# Altium schematic symbol library Capacitor.SchLib: 735 symbols (part 12 of 20)
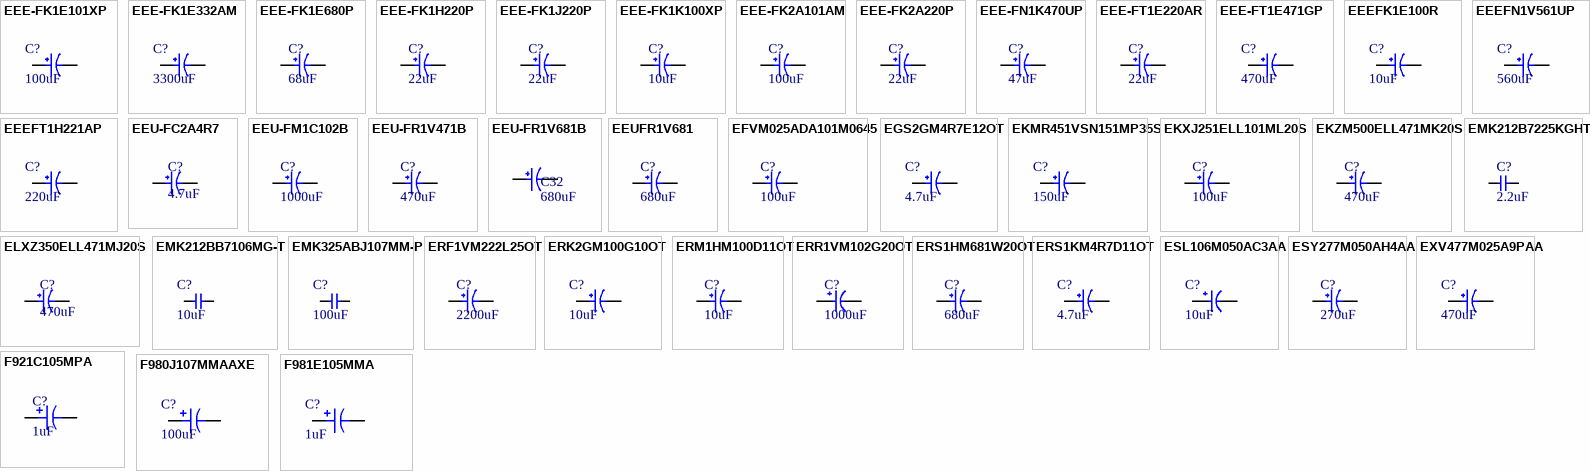
[diagram p29: symbols EEE-FK1E101XP to F981E105MMA]

## EEEFK1E100R
designator C?, comment 10uF
CAP ALUM 10UF 20% 25V SMD; Manufacturer: Panasonic; Manufacturer Part Number: EEE-FK1E100R; Dielectric Material: Aluminium; Ripple Current: 90mA; ESR (Equivalent Series Resistance): 1.35R; Polarity: Polar; Life (Hours): 2000Hour; Leakage Current: 3uA; Item Type: Capacitor; Supplier 1: Digi-Key; Stock 1: 332; Pricing 1: 1=0.38, 10=0.264, 50=0.1852, 100=0.1587, 500=0.11902, 1000=0.10051 (USD); Mount: Surface Mount,PCB; Case/Package: Radial; Number of Pins: 2; Contact Plating: Tin; Min Operating Temperature: -55°C; Max Operating Temperature: 105°C; Capacitance: 10uF; Tolerance: 20%; Voltage Rating (DC): 25V; Packaging: Tape and Reel; Voltage Rating: 25V; Ripple Current (AC): 90mA; Impedance: 1.35R; Package Quantity: 1; Termination: SMD/SMT; Voltage: 25V; Series: FK; Construction: Cylindrical; Diameter: 4mm; Length: 5.8mm; Width: 5.5mm; Height: 5.8mm; Height - Seated (Max): 0.24inch; Radiation Hardening: No; REACH SVHC: No SVHC; Lead Free: Lead Free; RoHS Compliant: Yes; ComponentLink1URL: http://www.jameco.com/Jameco/Products/ProdDS/1357642.pdf?src-supplier=Jameco; ComponentLink1Description: http://www.jameco.com/Jameco/Products/ProdDS/1357642.pdf?src-supplier=Jameco; ComponentLink2URL: http://www.farnell.com/datasheets/2002520.pdf?src-supplier=Farnell; ComponentLink2Description: http://www.farnell.com/datasheets/2002520.pdf?src-supplier=Farnell; ComponentLink3URL: http://www.farnell.com/datasheets/58258.pdf?src-supplier=Element14; ComponentLink3Description: http://www.farnell.com/datasheets/58258.pdf?src-supplier=Element14; ComponentLink4URL: http://www.mouser.com/ds/2/315/ABA0000CE120-68386.pdf?src-supplier=Mouser; ComponentLink4Description: http://www.mouser.com/ds/2/315/ABA0000CE120-68386.pdf?src-supplier=Mouser; ComponentLink5URL: http://uk.rs-online.com/webdocs/139e/0900766b8139e400.pdf?src-supplier=RSComponents; ComponentLink5Description: http://uk.rs-online.com/webdocs/139e/0900766b8139e400.pdf?src-supplier=RSComponents; ComponentLink6URL: http://www.farnell.com/datasheets/2813657.pdf?src-supplier=Farnell; ComponentLink6Description: http://www.farnell.com/datasheets/2813657.pdf?src-supplier=Farnell; ComponentLink7URL: http://www.farnell.com/datasheets/2002520.pdf?src-supplier=Element14; ComponentLink7Description: http://www.farnell.com/datasheets/2002520.pdf?src-supplier=Element14; ComponentLink8URL: http://www.farnell.com/datasheets/1676921.pdf?src-supplier=Element14; ComponentLink8Description: http://www.farnell.com/datasheets/1676921.pdf?src-supplier=Element14; ComponentLink9URL: http://industrial.panasonic.com/www-data/pdf/ABA0000/ABA0000CE120.pdf?src-supplier=Avnet; ComponentLink9Description: http://industrial.panasonic.com/www-data/pdf/ABA0000/ABA0000CE120.pdf?src-supplier=Avnet; ComponentLink10URL: http://industrial.panasonic.com/www-data/pdf/ABA0000/ABA0000CE120.pdf?src-supplier=Future+Electronics; ComponentLink10Description: http://industrial.panasonic.com/www-data/pdf/ABA0000/ABA0000CE120.pdf?src-supplier=Future+Electronics; ComponentLink11URL: https://www.verical.com/server-webapp/html/getDatasheet?partID=134702&src-supplier=Verical; ComponentLink11Description: https://www.verical.com/server-webapp/html/getDatasheet?partID=134702&src-supplier=Verical; ComponentLink12URL: http://industrial.panasonic.com/www-data/pdf/ABA0000/ABA0000CE120.pdf?src-supplier=Avnet+Europe; ComponentLink12Description: http://industrial.panasonic.com/www-data/pdf/ABA0000/ABA0000CE120.pdf?src-supplier=Avnet+Europe; Supplier Part Number 1: PCE3795CT-ND; LCSC Part Number: C178538
footprint EEEFK1E100R_
pins: 1, 2

## EEEFN1V561UP
designator C?, comment 560uF
CAP ALUM 560UF 20% 35V SMD; Manufacturer: Panasonic; Manufacturer Part Number: EEE-FN1V561UP; Item Type: Capacitor; Supplier 1: Rs; RoHS: No; Category: Capacitors; Stock 1: 500; Pricing 1: 100=0.47200, 250=0.44600 (GBP); ComponentLink1URL: http://datasheet.octopart.com/EEEFN1V561UP-Panasonic-datasheet-150570765.pdf?src-supplier=Rs; ComponentLink1Description: http://datasheet.octopart.com/EEEFN1V561UP-Panasonic-datasheet-150570765.pdf?src-supplier=Rs; Supplier Part Number 1: 2043401P; LCSC Part Number: C494848
footprint EEEFN1V561UP
pins: 1, 2

## EEEFT1H221AP
designator C?, comment 220uF
CAP ALUM 220UF 20% 50V SMD; Manufacturer: Panasonic; Manufacturer Part Number: EEEFT1H221AP; Dielectric Material: Aluminium; Ripple Current: 670mA; ESR (Equivalent Series Resistance): 180mR; Life (Hours): 2000Hour; Leakage Current: 110uA; Lead Diameter: 0.9mm; Item Type: Capacitor; Supplier 1: Avnet; RoHS: Yes; Category: Aluminum Electrolytic Capacitors; Stock 1: 22638; Pricing 1: 1=1.43000, 10=1.11000, 25=1.01000, 50=0.90500, 100=0.80400 (USD); Mount: Surface Mount,PCB; Case/Package: Radial; Number of Pins: 2; Contact Plating: Tin; Min Operating Temperature: -55°C; Max Operating Temperature: 105°C; Capacitance: 220uF; Voltage Rating: 50V; Tolerance: 20%; Packaging: Tape and Reel; Package Quantity: 500; Ripple Current (AC): 670mA; Voltage Rating (DC): 50V; Termination: SMD/SMT; Voltage: 50V; Series: FT; Construction: Cylindrical; Diameter: 8mm; Length: 10.2mm; Height: 10.2mm; Lead Pitch: 3.1mm; Height - Seated (Max): 0.413inch; Ratings: AEC-Q200; Radiation Hardening: No; Reach SVHC Compliant: Yes; Lead Free: Lead Free; RoHS Compliant: Yes; ComponentLink1URL: https://datasheet.ciiva.com/11783/0900766b80f4973e-11783665.pdf?src-supplier=RSComponents; ComponentLink1Description: https://datasheet.ciiva.com/11783/0900766b80f4973e-11783665.pdf?src-supplier=RSComponents; ComponentLink2URL: https://datasheet.ciiva.com/48523/smd-ft-eng-tds-48523263.pdf?src-supplier=Distrelec; ComponentLink2Description: https://datasheet.ciiva.com/48523/smd-ft-eng-tds-48523263.pdf?src-supplier=Distrelec; ComponentLink3URL: https://datasheet.ciiva.com/43458/1790597-43458703.pdf?src-supplier=Farnell; ComponentLink3Description: https://datasheet.ciiva.com/43458/1790597-43458703.pdf?src-supplier=Farnell; ComponentLink4URL: https://datasheet.ciiva.com/6025/1790597-6025836.pdf?src-supplier=Farnell; ComponentLink4Description: https://datasheet.ciiva.com/6025/1790597-6025836.pdf?src-supplier=Farnell; ComponentLink5URL: https://datasheet.ciiva.com/46376/1790597-46376766.pdf?src-supplier=Element14; ComponentLink5Description: https://datasheet.ciiva.com/46376/1790597-46376766.pdf?src-supplier=Element14; ComponentLink6URL: https://datasheet.ciiva.com/28691/1244238-28691159.pdf?src-supplier=Element14; ComponentLink6Description: https://datasheet.ciiva.com/28691/1244238-28691159.pdf?src-supplier=Element14; ComponentLink7URL: https://datasheet.ciiva.com/28691/1244238-28691150.pdf?src-supplier=Element14; ComponentLink7Description: https://datasheet.ciiva.com/28691/1244238-28691150.pdf?src-supplier=Element14; ComponentLink8URL: https://datasheet.ciiva.com/46385/1790597-46385166.pdf?src-supplier=Element14; ComponentLink8Description: https://datasheet.ciiva.com/46385/1790597-46385166.pdf?src-supplier=Element14; ComponentLink9URL: https://datasheet.ciiva.com/24070/aba0000ce135-31031-24070059.pdf?src-supplier=Mouser; ComponentLink9Description: https://datasheet.ciiva.com/24070/aba0000ce135-31031-24070059.pdf?src-supplier=Mouser; ComponentLink10URL: https://datasheet.ciiva.com/14599/70243693-14599500.pdf?src-supplier=Allied+Electronics; ComponentLink10Description: https://datasheet.ciiva.com/14599/70243693-14599500.pdf?src-supplier=Allied+Electronics; ComponentLink11URL: https://datasheet.ciiva.com/14607/70243693-14607598.pdf?src-supplier=Allied+Electronics; ComponentLink11Description: https://datasheet.ciiva.com/14607/70243693-14607598.pdf?src-supplier=Allied+Electronics; ComponentLink12URL: https://datasheet.ciiva.com/14606/70243693-14606280.pdf?src-supplier=Allied+Electronics; ComponentLink12Description: https://datasheet.ciiva.com/14606/70243693-14606280.pdf?src-supplier=Allied+Electronics; ComponentLink13URL: https://datasheet.ciiva.com/10331/aba0000ce135-10331093.pdf?src-supplier=Avnet; ComponentLink13Description: https://datasheet.ciiva.com/10331/aba0000ce135-10331093.pdf?src-supplier=Avnet; ComponentLink14URL: https://datasheet.ciiva.com/30060/aba0000ce135-30060199.pdf?src-supplier=Onlinecomponents.com; ComponentLink14Description: https://datasheet.ciiva.com/30060/aba0000ce135-30060199.pdf?src-supplier=Onlinecomponents.com; Supplier Part Number 1: 31T8183; LCSC Part Number: C178594
footprint EEEFT1H221AP
pins: 1, 2

## EEU-FC2A4R7
designator C?, comment 4.7uF
CAP ALUM 4.7UF 20% 100V RADIAL; Item Type: Capacitor; ComponentLink1Description: LCSC; Supplier: Mouser; Supplier Part Number: 667-EEU-FC2A4R7; RoHS: Yes; Category: Aluminum Electrolytic Capacitors; Stock: 2974; Pricing: 1=0.3, 10=0.165, 50=0.165, 100=0.106, 1000=0.089, 10000=0.072 (USD); ComponentLink2URL: https://datasheet.ciiva.com/6330/aba0000ce22-6330526.pdf?src-supplier=Digi-Key; ComponentLink2Description: https://datasheet.ciiva.com/6330/aba0000ce22-6330526.pdf?src-supplier=Digi-Key; ComponentLink3URL: https://datasheet.ciiva.com/22739/1790611-22739989.pdf?src-supplier=Farnell; ComponentLink3Description: https://datasheet.ciiva.com/22739/1790611-22739989.pdf?src-supplier=Farnell; ComponentLink4URL: https://datasheet.ciiva.com/22674/1790611-22674953.pdf?src-supplier=Element14; ComponentLink4Description: https://datasheet.ciiva.com/22674/1790611-22674953.pdf?src-supplier=Element14; ComponentLink5URL: https://datasheet.ciiva.com/30009/aba0000ce22-30009135.pdf?src-supplier=Avnet; ComponentLink5Description: https://datasheet.ciiva.com/30009/aba0000ce22-30009135.pdf?src-supplier=Avnet
footprint EEU-FC2A4R7
pins: 1, 2

## EEU-FM1C102B
designator C?, comment 1000uF
CAP ALUM 1000UF 20% 16V RADIAL; Manufacturer: Panasonic; Manufacturer Part Number: EEU-FM1C102B; Item Type: Capacitors; Value: 1mF; Ripple Current: 2.18A; Impedance: 19mR; Life (Hours): 5000Hour; Lead Diameter: 0.6mm; Supplier: Mouser; LCSC Part Number: C1588681; RoHS: Yes; Stock: 1140; Pricing: 1=0.79, 10=0.466, 50=0.466, 100=0.372, 1000=0.26, 10000=0.219 (USD); Mounting Technology: Through Hole; Case/Package: Radial; Min Operating Temperature: -40°C; Max Operating Temperature: 105°C; Voltage Rating: 16V; Tolerance: 20%; Packaging: Ammo Pack; Package Quantity: 500; Voltage Rating (DC): 16V; ESR (Equivalent Series Resistance): 19mR; Termination: Radial; Series: FM; Diameter: 10mm; Length: 20mm; Height: 20mm; Lead Pitch: 5mm; Height - Seated (Max): 0.866inch; Radiation Hardening: No; Lead Free: Lead Free; RoHS Compliant: Yes; ComponentLink1URL: https://datasheet.ciiva.com/24025/a-e-461514-24025941.pdf?src-supplier=Mouser; ComponentLink1Description: https://datasheet.ciiva.com/24025/a-e-461514-24025941.pdf?src-supplier=Mouser; ComponentLink2URL: https://datasheet.ciiva.com/11677/aba0000ce108-11677710.pdf?src-supplier=Avnet; ComponentLink2Description: https://datasheet.ciiva.com/11677/aba0000ce108-11677710.pdf?src-supplier=Avnet
footprint EEU-FM1C102B
pins: 1, 2

## EEU-FR1V471B
designator C?, comment 470uF
CAP ALUM 470UF 20% 35V RADIAL; Manufacturer: Panasonic; Manufacturer Part Number: EEU-FR1V471B; Item Type: Capacitor; Leakage Current: 164.5uA; Supplier: Mouser; LCSC Part Number: C713403; RoHS: Yes; Stock: 21799; Pricing: 1=0.78, 10=0.461, 50=0.461, 100=0.375, 1000=0.263, 10000=0.23 (USD); Pins: 2NUMBER; Lead Free: 5697LeadFree; ComponentLink1URL: https://datasheet.ciiva.com/43469/1653413-43469590.pdf?src-supplier=Farnell; ComponentLink1Description: https://datasheet.ciiva.com/43469/1653413-43469590.pdf?src-supplier=Farnell; ComponentLink2URL: https://datasheet.ciiva.com/11678/aba0000ce132-11678063.pdf?src-supplier=Avnet; ComponentLink2Description: https://datasheet.ciiva.com/11678/aba0000ce132-11678063.pdf?src-supplier=Avnet; ComponentLink3URL: https://datasheet.ciiva.com/46371/1653413-46371772.pdf?src-supplier=Element14; ComponentLink3Description: https://datasheet.ciiva.com/46371/1653413-46371772.pdf?src-supplier=Element14; ComponentLink4URL: https://datasheet.ciiva.com/7805/1725490-7805503.pdf?src-supplier=Element14; ComponentLink4Description: https://datasheet.ciiva.com/7805/1725490-7805503.pdf?src-supplier=Element14; ComponentLink5URL: https://datasheet.ciiva.com/30252/9aba0000ce132-30252342.pdf?src-supplier=Onlinecomponents.com; ComponentLink5Description: https://datasheet.ciiva.com/30252/9aba0000ce132-30252342.pdf?src-supplier=Onlinecomponents.com; ComponentLink6URL: https://datasheet.ciiva.com/16387/aba0000ce132-16387061.pdf?src-supplier=Future+Electronics; ComponentLink6Description: https://datasheet.ciiva.com/16387/aba0000ce132-16387061.pdf?src-supplier=Future+Electronics; ComponentLink7URL: https://datasheet.ciiva.com/14602/70257620-14602201.pdf?src-supplier=Allied+Electronics; ComponentLink7Description: https://datasheet.ciiva.com/14602/70257620-14602201.pdf?src-supplier=Allied+Electronics; ComponentLink8URL: https://datasheet.ciiva.com/29247/448536-da-01-en-alu-kondensator-fr-r-470-uf-35v-500st-29247995.pdf?src-supplier=Conrad; ComponentLink8Description: https://datasheet.ciiva.com/29247/448536-da-01-en-alu-kondensator-fr-r-470-uf-35v-500st-29247995.pdf?src-supplier=Conrad
footprint EEUFR1V471B
pins: 1, 2

## EEU-FR1V681B
designator C32, comment 680uF
CAP ALUM 680UF 20% 35V RADIAL TH; Manufacturer: Panasonic; Manufacturer Part Number: EEU-FR1V681B; Item Type: Capacitor; Ripple Current: 2.18A; Impedance: 20mR; Life (Hours): 10000Hour; Lead/Base Style: Straight; Lead Diameter: 0.6mm; Supplier: Digikey; LCSC Part Number: C178718; RoHS: Yes; Stock: 566; Pricing: 1=0.93, 10=0.674, 50=0.5894, 100=0.4803 (USD); Mounting Technology: Through Hole; Case/Package: Radial; Min Operating Temperature: -40°C; Max Operating Temperature: 105°C; Package Quantity: 500; Value: 680uF; Voltage Rating: 35V; Tolerance: 20%; Packaging: Tape and Reel; Voltage Rating (DC): 35V; ESR (Equivalent Series Resistance): 20mR; Termination: Radial; Series: FR; Features: General Purpose; Diameter: 10mm; Length: 20mm; Height: 20mm; Lead Pitch: 5mm; Height - Seated (Max): 0.866inch; Radiation Hardening: No; Reach SVHC Compliant: Yes; RoHS Compliant: Yes; ComponentLink1URL: https://datasheet.ciiva.com/11677/aba0000ce132-11677705.pdf?src-supplier=Avnet; ComponentLink1Description: https://datasheet.ciiva.com/11677/aba0000ce132-11677705.pdf?src-supplier=Avnet; ComponentLink2URL: https://datasheet.ciiva.com/15941/aba0000ce132-15941222.pdf?src-supplier=Onlinecomponents.com; ComponentLink2Description: https://datasheet.ciiva.com/15941/aba0000ce132-15941222.pdf?src-supplier=Onlinecomponents.com; ComponentLink3URL: https://datasheet.ciiva.com/43469/1653413-43469593.pdf?src-supplier=Farnell; ComponentLink3Description: https://datasheet.ciiva.com/43469/1653413-43469593.pdf?src-supplier=Farnell; ComponentLink4URL: https://datasheet.ciiva.com/46371/1653413-46371786.pdf?src-supplier=Element14; ComponentLink4Description: https://datasheet.ciiva.com/46371/1653413-46371786.pdf?src-supplier=Element14; ComponentLink5URL: https://datasheet.ciiva.com/29248/448590-da-01-en-alu-kondensator-fr-r-680-uf-35v-500st-29248054.pdf?src-supplier=Conrad; ComponentLink5Description: https://datasheet.ciiva.com/29248/448590-da-01-en-alu-kondensator-fr-r-680-uf-35v-500st-29248054.pdf?src-supplier=Conrad
footprint EEU-FR1V681B
pins: 1, 2

## EEUFR1V681
designator C?, comment 680uF
680uF 35V 20mΩ@100kHz ±20% 2.18A@100kHz Plugin,D10xL20mm Aluminum Electrolytic Capacitors - Leaded ROHS; Manufacturer: PANASONIC; Manufacturer Part Number: EEUFR1V681; Package: Plugin,D10xL20mm; LCSC Part Number: C178718; Item Type: Capacitor; ComponentLink1Description: LCSC; ComponentLink1URL: https://www.lcsc.com/product-detail/Aluminum-Electrolytic-Capacitors-Leaded_PANASONIC-EEUFR1V681_C178718.html
footprint EEUFR1V681
pins: 1, 2

## EFVM025ADA101M0645
designator C?, comment 100uF
100uF 25V ±20% SMD,D6.3xL4.5mm Aluminum Electrolytic Capacitors - SMD ROHS; Manufacturer: FOLLON; Manufacturer Part Number: EFVM025ADA101M0645; Package: SMD,D6.3xL4.5mm; LCSC Part Number: C33129633; Item Type: Capacitor; ComponentLink1Description: LCSC; ComponentLink1URL: https://lcsc.com/product-detail/Aluminum-Electrolytic-Capacitors-SMD_FOLLON-EFVM025ADA101M0645_C33129633.html
footprint EFVM025ADA101M0645
pins: 1, 2

## EGS2GM4R7E12OT
designator C?, comment 4.7uF
4.7uF 400V ±20% Plugin,D6.3xL12mm Aluminum Electrolytic Capacitors - Leaded ROHS; Manufacturer: AISHI; Manufacturer Part Number: EGS2GM4R7E12OT; Package: Plugin,D6.3xL12mm; ComponentLink1Description: LCSC; ComponentLink1URL: https://www.lcsc.com/product-detail/Aluminum-Electrolytic-Capacitors-Leaded_AISHI-Aihua-Group-EGS2GM4R7E12OT_C106368.html; LCSC Part Number: C106368; Item Type: Capacitor
footprint EGS2GM4R7E12OT
pins: 1, 2

## EKMR451VSN151MP35S
designator C?, comment 150uF
20% 450V 150uF Plugin,D22xL35mm Horn-Type Electrolytic Capacitors ROHS; Manufacturer: NCC(Nippon Chemi-Con); Manufacturer Part Number: EKMR451VSN151MP35S; Package: Plugin,D22xL35mm; LCSC Part Number: C920285; Item Type: Capacitor; ComponentLink1Description: LCSC; ComponentLink1URL: https://jlcpcb.com/partdetail/999183-EKMR451VSN151MP35S/C920285
footprint EKMR451VSN151MP35S
pins: 1, 2

## EKXJ251ELL101ML20S
designator C?, comment 100uF
100uF 250V ±20% 635mA@120Hz Plugin,D16xL20mm Aluminum Electrolytic Capacitors - Leaded ROHS; Manufacturer: NCC(Nippon Chemi-Con); Manufacturer Part Number: EKXJ251ELL101ML20S; Package: Plugin,D16xL20mm; LCSC Part Number: C337260; Item Type: Capacitor; ComponentLink1Description: LCSC; ComponentLink1URL: https://www.lcsc.com/product-detail/Aluminum-Electrolytic-Capacitors-Leaded_NCC-Nippon-Chemi-Con-EKXJ251ELL101ML20S_C337260.html
footprint EKXJ251ELL101ML20S
pins: 1, 2

## EKZM500ELL471MK20S
designator C?, comment 470uF
CAP ALUM 50V POLAR; Manufacturer: United Chemi-Con; Manufacturer Part Number: EKZM500ELL471MK20S; Tolerance: 20%; Dissipation Factor: 0.1%; Supplier: Digikey; Supplier Part Number: 565-EKZM500ELL471MK20S-ND; RoHS: Yes; Category: Aluminum Electrolytic Capacitors; Stock: 1959; Pricing: 1=1.02, 10=0.631, 50=0.4744, 100=0.4255, 500=0.34218, 1000=0.31616, 3000=0.28378, 5000=0.27172 (USD); Case/Package: Aluminum; Min Operating Temperature: -40°C; Max Operating Temperature: 105°C; Packaging: Bulk; Voltage Rating: 50V; Value: 470uF; Termination: Radial; Series: KZM; Length: 20mm; RoHS Compliant: Yes; ComponentLink1URL: http://www.mouser.com/ds/2/420/15133587752d6c58fb020c-1090524.pdf?src-supplier=Mouser; ComponentLink1Description: http://www.mouser.com/ds/2/420/15133587752d6c58fb020c-1090524.pdf?src-supplier=Mouser
footprint EKZM500ELL471MK20S
pins: 1, 2

## ELXZ350ELL471MJ20S
designator C?, comment 470uF
CAP ALUM 470UF 20% 35V RADIAL; Item Type: Capacitor; Dielectric Material: Aluminium; Ripple Current: 1.22A; ESR (Equivalent Series Resistance): 52mR; Life (Hours): 5000Hour; Lead Diameter: 0.6mm; LCSC Part Number: C1669323; ComponentLink1Description: LCSC; Supplier: Rs; Supplier Part Number: 390120; RoHS: Yes; Category: Aluminum Electrolytic Capacitors; Stock: 615; Pricing: 5=0.094, 25=0.54, 50=0.512, 100=0.488, 250=0.476 (GBP); Mounting Technology: Through Hole; Case/Package: Radial; Min Operating Temperature: -55°C; Max Operating Temperature: 105°C; Value: 470uF; Tolerance: 20%; Voltage Rating: 35V; Package Quantity: 2000; Packaging: Bulk; Impedance: 52mR; Termination: Radial; Voltage Rating (DC): 35V; Series: LXZ; Construction: RADIAL; Diameter: 10mm; Length: 20mm; Height: 20mm; Lead Pitch: 5mm; Ratings: AEC-Q200; Radiation Hardening: No; Lead Free: Lead Free; RoHS Compliant: Yes; Reach SVHC Compliant: Unknown; ComponentLink2URL: https://datasheet.ciiva.com/15165/getdatasheetpartid-102547-15165912.pdf?src-supplier=Verical; ComponentLink2Description: https://datasheet.ciiva.com/15165/getdatasheetpartid-102547-15165912.pdf?src-supplier=Verical; ComponentLink3URL: https://datasheet.ciiva.com/15948/20cat-db-al-cgieejppdfnamelxz-cgieejppdfnamelxz-15948790.pdf?src-supplier=Onlinecomponents.com; ComponentLink3Description: https://datasheet.ciiva.com/15948/20cat-db-al-cgieejppdfnamelxz-cgieejppdfnamelxz-15948790.pdf?src-supplier=Onlinecomponents.com; ComponentLink4URL: https://datasheet.ciiva.com/22620/1697097-22620536.pdf?src-supplier=Element14; ComponentLink4Description: https://datasheet.ciiva.com/22620/1697097-22620536.pdf?src-supplier=Element14; ComponentLink5URL: https://datasheet.ciiva.com/7910/1348889-7910316.pdf?src-supplier=Element14; ComponentLink5Description: https://datasheet.ciiva.com/7910/1348889-7910316.pdf?src-supplier=Element14; ComponentLink6URL: https://datasheet.ciiva.com/29247/447742-da-01-en-elko-470-uf-35v-105c-2000st-29247655.pdf?src-supplier=Conrad; ComponentLink6Description: https://datasheet.ciiva.com/29247/447742-da-01-en-elko-470-uf-35v-105c-2000st-29247655.pdf?src-supplier=Conrad
footprint ELXZ350ELL471MJ20S
pins: 1, 2

## EMK212B7225KGHT
designator C?, comment 2.2uF
CAP CER 2.2UF 16V X7R 0805; Manufacturer: Taiyo Yuden; Manufacturer Part Number: EMK212B7225KGHT; Item Type: Capacitors; Material: 4241ConductorMaterial; Supplier: Digikey; LCSC Part Number: C385899; RoHS: Yes; Stock: 8236; Pricing: 1=0.24, 10=0.137, 50=0.097, 100=0.0847, 500=0.06374, 1000=0.05721 (USD); Lead Free: 5697LeadFree; Halogen Free: 5694HalogenFree; ComponentLink1URL: http://www.mouser.com/ds/2/396/mlcc11_hq_e-541564.pdf?src-supplier=Mouser; ComponentLink1Description: http://www.mouser.com/ds/2/396/mlcc11_hq_e-541564.pdf?src-supplier=Mouser; ComponentLink2URL: https://datasheet.octopart.com/EMK212B7225KGHT-Taiyo-Yuden-datasheet-152732874.pdf?src-supplier=Newark; ComponentLink2Description: https://datasheet.octopart.com/EMK212B7225KGHT-Taiyo-Yuden-datasheet-152732874.pdf?src-supplier=Newark; ComponentLink3URL: https://datasheet.octopart.com/EMK212B7225KGHT-Taiyo-Yuden-datasheet-97186030.pdf?src-supplier=Future+Electronics; ComponentLink3Description: https://datasheet.octopart.com/EMK212B7225KGHT-Taiyo-Yuden-datasheet-97186030.pdf?src-supplier=Future+Electronics; ComponentLink4URL: https://ds.yuden.co.jp/TYCOMPAS/ut/detail?pn=EMK212B7225KGHT  &amp;u=M&src-supplier=Digikey; ComponentLink4Description: https://ds.yuden.co.jp/TYCOMPAS/ut/detail?pn=EMK212B7225KGHT  &amp;u=M&src-supplier=Digikey; ComponentLink5URL: http://www.yuden.co.jp/productdata/catalog/en/mlcc01_hq_e.pdf?src-supplier=Digikey; ComponentLink5Description: http://www.yuden.co.jp/productdata/catalog/en/mlcc01_hq_e.pdf?src-supplier=Digikey; ComponentLink6URL: http://www.yuden.co.jp/ut/product/category/capacitor/putpdf/EMK212B7225KGHT.pdf?src-supplier=Avnet; ComponentLink6Description: http://www.yuden.co.jp/ut/product/category/capacitor/putpdf/EMK212B7225KGHT.pdf?src-supplier=Avnet; ComponentLink7URL: https://datasheet.octopart.com/EMK212B7225KGHT-Taiyo-Yuden-datasheet-154808297.pdf?src-supplier=Master+Electronics; ComponentLink7Description: https://datasheet.octopart.com/EMK212B7225KGHT-Taiyo-Yuden-datasheet-154808297.pdf?src-supplier=Master+Electronics
footprint Cap-0805 (SMD 0805)
pins: 1, 2

## EMK212BB7106MG-T
designator C?, comment 10uF
CAP CER 10UF 16V X7R 0805; Manufacturer: Taiyo Yuden; Manufacturer Part Number: EMK212BB7106MG-T; Tolerance: 20%; Item Type: Capacitor; Supplier 1: Digi-Key; RoHS: Yes; Category: Ceramic Capacitors; Stock 1: 896107; Pricing 1: 1=0.40000, 10=0.28000, 50=0.19620, 100=0.16820, 500=0.12612, 1000=0.10650 (USD); Mount: Surface Mount; Case/Package: 0805; Case Code (Metric): 2012; Case Code (Imperial): 0805; Min Operating Temperature: -55°C; Max Operating Temperature: 125°C; Package Quantity: 3000; Packaging: Tape and Reel; Capacitance: 10uF; Voltage Rating: 16V; Voltage Rating (DC): 16V; Dielectric: X7R; Termination: SMD/SMT; Resistor Type: Ceramic; Length: 2mm; Width: 0.049inch; Height: 1.25mm; Thickness: 0.053inch; Ratings: AEC-Q200; Halogen Free: Halogen Free; RoHS Compliant: Yes; ComponentLink1URL: https://datasheet.ciiva.com/24393/472emk212bb7106mg-t-24393497.pdf?src-supplier=Onlinecomponents.com; ComponentLink1Description: https://datasheet.ciiva.com/24393/472emk212bb7106mg-t-24393497.pdf?src-supplier=Onlinecomponents.com; ComponentLink2URL: https://datasheet.ciiva.com/30229/379emk212bb7106mg-t-30229719.pdf?src-supplier=Onlinecomponents.com; ComponentLink2Description: https://datasheet.ciiva.com/30229/379emk212bb7106mg-t-30229719.pdf?src-supplier=Onlinecomponents.com; ComponentLink3URL: https://datasheet.ciiva.com/18697/mlcc-all-e-18697736.pdf?src-supplier=Digi-Key; ComponentLink3Description: https://datasheet.ciiva.com/18697/mlcc-all-e-18697736.pdf?src-supplier=Digi-Key; ComponentLink4URL: https://datasheet.ciiva.com/18697/mlcc-all-e-18697735.pdf?src-supplier=Digi-Key; ComponentLink4Description: https://datasheet.ciiva.com/18697/mlcc-all-e-18697735.pdf?src-supplier=Digi-Key; ComponentLink5URL: https://datasheet.ciiva.com/18697/mlcc-all-e-18697737.pdf?src-supplier=Digi-Key; ComponentLink5Description: https://datasheet.ciiva.com/18697/mlcc-all-e-18697737.pdf?src-supplier=Digi-Key; ComponentLink6URL: https://datasheet.ciiva.com/15376/mlcc01-e-15376088.pdf?src-supplier=Mouser; ComponentLink6Description: https://datasheet.ciiva.com/15376/mlcc01-e-15376088.pdf?src-supplier=Mouser; Supplier Part Number 1: 587-3319-1-ND; LCSC Part Number: C141287
footprint Cap-0805 (SMD 0805)
pins: 1, 2

## EMK325ABJ107MM-P
designator C?, comment 100uF
CAP CER 100UF 16V X5R 1210; Manufacturer: Taiyo Yuden; Manufacturer Part Number: EMK325ABJ107MM-P; Tolerance: 20%; Item Type: Capacitor; Supplier 1: Digi-Key; RoHS: Yes; Category: Ceramic Capacitors; Stock 1: 81344; Pricing 1: 1=1.75, 10=1.415, 50=1.2352, 100=1.0809, 500=0.82352 (USD); Mounting Technology: Surface Mount; Case/Package: 1210; Case Code (Imperial): 1210; Case Code (Metric): 3225; Min Operating Temperature: -55°C; Max Operating Temperature: 85°C; Packaging: Cut Tape; Value: 100uF; Voltage Rating: 16V; Series: M; Lead Free: Lead Free; RoHS Compliant: Yes; ComponentLink1URL: http://ds.yuden.co.jp/TYCOMPAS/ut/detail.do?productNo=EMK325ABJ107MM-P&fileName=EMK325ABJ107MM-P_SS&mode=specSheetDownload&src-supplier=Digi-Key; ComponentLink1Description: http://ds.yuden.co.jp/TYCOMPAS/ut/detail.do?productNo=EMK325ABJ107MM-P&fileName=EMK325ABJ107MM-P_SS&mode=specSheetDownload&src-supplier=Digi-Key; Supplier Part Number 1: 587-5426-1-ND; LCSC Part Number: C90143
footprint Cap-1210 (SMD 1210)
pins: 1, 2

## ERF1VM222L25OT
designator C?, comment 2200uF
2200uF 35V ±20% Plugin,D16xL25mm Aluminum Electrolytic Capacitors - Leaded ROHS; Manufacturer: AISHI; Manufacturer Part Number: ERF1VM222L25OT; Supplier: Farnell; LCSC Part Number: C106547; RoHS: No; Stock: 115; Pricing: 1=0.945, 10=0.446, 25=0.403, 50=0.338, 100=0.327, 250=0.316 (GBP); Item Type: Capacitor
footprint ERF1VM222L25OT
pins: 1, 2

## ERK2GM100G10OT
designator C?, comment 10uF
10uF 400V ±20% Plugin,D10xL10mm Aluminum Electrolytic Capacitors - Leaded ROHS; Manufacturer: AISHI(Aihua Group); Manufacturer Part Number: ERK2GM100G10OT; ComponentLink1Description: LCSC; ComponentLink1URL: https://www.lcsc.com/product-detail/Aluminum-Electrolytic-Capacitors-Leaded_AISHI-Aihua-Group-ERK2GM100G10OT_C112498.html; Package: Plugin,D10xL10mm; LCSC Part Number: C112498; Item Type: Electrolytic Capacitor
footprint ERK2GM100G10OT
pins: 1, 2

## ERM1HM100D11OT
designator C?, comment 10uF
10uF 50V ±20% 90mA@100kHz Plugin,D5xL11mm Aluminum Electrolytic Capacitors - Leaded ROHS; Manufacturer: AISHI; Manufacturer Part Number: ERM1HM100D11OT; Supplier: Future Electronics; LCSC Part Number: C106599; RoHS: No; Pricing: 1000=0.0178, 4000=0.017, 15000=0.0163, 40000=0.0158, 100000=0.015 (USD); Item Type: Capacitor
footprint ERM1HM100D11OT
pins: 1, 2

## ERR1VM102G20OT
designator C?, comment 1000uF
1000uF 35V ±20% Plugin,D10xL20mm Aluminum Electrolytic Capacitors - Leaded ROHS; Manufacturer: AISHI; Manufacturer Part Number: ERR1VM102G20OT; Package: Plugin,D10xL20mm; LCSC Part Number: C398835; Item Type: Capacitor; ComponentLink1Description: LCSC; ComponentLink1URL: https://www.lcsc.com/product-detail/Aluminum-Electrolytic-Capacitors-Leaded_AISHI-Aihua-Group-ERR1VM102G20OT_C398835.html
footprint ERR1VM102G20OT
pins: 1, 2

## ERS1HM681W20OT
designator C?, comment 680uF
680uF 50V ±20% Plugin,D12.5xL20mm Aluminum Electrolytic Capacitors - Leaded ROHS; Manufacturer: AISHI; Manufacturer Part Number: ERS1HM681W20OT; Package: Plugin,D12.5xL20mm; LCSC Part Number: C106668; Item Type: Capacitor; ComponentLink1Description: LCSC; ComponentLink1URL: https://www.lcsc.com/product-detail/Aluminum-Electrolytic-Capacitors-Leaded_AISHI-Aihua-Group-ERS1HM681W20OT_C106668.html
footprint ERS1HM681W20OT
pins: 1, 2

## ERS1KM4R7D11OT
designator C?, comment 4.7uF
4.7uF 100V ±20% Plugin,D5xL11mm Aluminum Electrolytic Capacitors - Leaded ROHS; Manufacturer: AISHI(Aihua Group); Manufacturer Part Number: ERS1KM4R7D11OT; Package: Plugin,D5xL11mm; LCSC Part Number: C106689; Item Type: Capacitor; ComponentLink1Description: LCSC; ComponentLink1URL: https://www.lcsc.com/product-detail/Aluminum-Electrolytic-Capacitors-Leaded_AISHI-Aihua-Group-ERS1KM4R7D11OT_C106689.html
footprint ERS1KM4R7D11OT
pins: 1, 2

## ESL106M050AC3AA
designator C?, comment 10uF
CAP ALUM 10UF 20% 50V RADIAL TH; Manufacturer: KEMET; Manufacturer Part Number: ESL106M050AC3AA; Item Type: Aluminum Electrolytic Capacitors; Value: 10µF; ESR (Equivalent Series Resistance): 1.35Ω; Leakage Current: 5µA; Ripple Current: 92.5mA; Supplier: DigiKey; LCSC Part Number: C1019597; RoHS: Compliant; Stock: 50489; Pricing: 1=0.18, 10=0.108, 50=0.0778, 100=0.068, 500=0.05104, 1000=0.04566, 2500=0.03989, 5000=0.03637 (USD); Case/Package: Radial; Diameter: 5mm; Length: 11mm; Lifecycle Status: Production; Max Operating Temperature: 105°C; Min Operating Temperature: -40°C; Number of Terminals: 2; Packaging: Bulk; REACH SVHC: Yes; Terminal Pitch: 2mm; Voltage Rating (DC): 50V; ComponentLink1URL: https://datasheet.octopart.com:443/ESL106M050AC3AA-KEMET-datasheet-182055926.pdf?src-supplier=IHS; ComponentLink1Description: https://datasheet.octopart.com:443/ESL106M050AC3AA-KEMET-datasheet-182055926.pdf?src-supplier=IHS; ComponentLink2URL: https://datasheet.octopart.com:443/ESL106M050AC3AA-KEMET-datasheet-175508936.pdf?src-supplier=Newark; ComponentLink2Description: https://datasheet.octopart.com:443/ESL106M050AC3AA-KEMET-datasheet-175508936.pdf?src-supplier=Newark; ComponentLink3URL: https://datasheet.octopart.com:443/ESL106M050AC3AA-KEMET-datasheet-182427411.pdf?src-supplier=Newark; ComponentLink3Description: https://datasheet.octopart.com:443/ESL106M050AC3AA-KEMET-datasheet-182427411.pdf?src-supplier=Newark
footprint ESL106M050AC3AA
pins: 1, 2

## ESY277M050AH4AA
designator C?, comment 270uF
CAP ALUM 270UF 20% 50V RADIAL; Manufacturer: KEMET; Manufacturer Part Number: ESY277M050AH4AA; Item Type: Capacitor; Supplier: Mouser; Supplier Part Number: 80-ESY277M050AH4AA; RoHS: Yes; Stock: 5386; Pricing: 1=0.62, 10=0.33, 50=0.33, 100=0.213, 1000=0.181, 10000=0.159 (USD)
footprint ESY277M050AH4AA
pins: 1, 2

## EXV477M025A9PAA
designator C?, comment 470uF
CAP ALUM 470UF 20% 25V SMD; Manufacturer: KEMET; Manufacturer Part Number: EXV477M025A9PAA; Life (Hours): 5000Hour; Supplier 1: Digi-Key; Stock 1: 3578; Pricing 1: 1=0.97, 10=0.739, 50=0.6138, 100=0.5286 (USD); Case/Package: Radial; Min Operating Temperature: -40°C; Max Operating Temperature: 105°C; Tolerance: 20%; Voltage Rating: 25V; Capacitance: 470uF; Packaging: Cut Tape; Voltage Rating (DC): 25V; Diameter: 10mm; Height: 10.2mm; REACH SVHC: No SVHC; RoHS Compliant: Yes; ComponentLink1URL: http://www.farnell.com/datasheets/1500293.pdf?src-supplier=Element14; ComponentLink1Description: http://www.farnell.com/datasheets/1500293.pdf?src-supplier=Element14; Supplier Part Number 1: 399-14793-1-ND; LCSC Part Number: C1984961
footprint EXV477M025A9PAA_
pins: 1, 2

## F921C105MPA
designator C?, comment 1uF
CAP TANT 1UF 20% 16V 0805; Manufacturer: Kyocera AVX; Manufacturer Part Number: F921C105MPA; Item Type: Capacitors; Supplier: Rs; Supplier Part Number: 1362613; RoHS: Yes; Stock: 1850; ComponentLink1URL: http://www.farnell.com/datasheets/2602418.pdf?src-supplier=Farnell; ComponentLink1Description: http://www.farnell.com/datasheets/2602418.pdf?src-supplier=Farnell; ComponentLink2URL: http://datasheet.octopart.com/F921C105MPA-KYOCERA-AVX-datasheet-104407996.pdf?src-supplier=Mouser; ComponentLink2Description: http://datasheet.octopart.com/F921C105MPA-KYOCERA-AVX-datasheet-104407996.pdf?src-supplier=Mouser; ComponentLink3URL: http://datasheet.octopart.com/F921C105MPA-KYOCERA-AVX-datasheet-104407996.pdf?src-supplier=Newark; ComponentLink3Description: http://datasheet.octopart.com/F921C105MPA-KYOCERA-AVX-datasheet-104407996.pdf?src-supplier=Newark; ComponentLink4URL: http://datasheet.octopart.com/F921C105MPA-KYOCERA-AVX-datasheet-104407996.pdf?src-supplier=Rs; ComponentLink4Description: http://datasheet.octopart.com/F921C105MPA-KYOCERA-AVX-datasheet-104407996.pdf?src-supplier=Rs; ComponentLink5URL: http://datasheet.octopart.com/F921C105MPA-KYOCERA-AVX-datasheet-104407996.pdf?src-supplier=Farnell; ComponentLink5Description: http://datasheet.octopart.com/F921C105MPA-KYOCERA-AVX-datasheet-104407996.pdf?src-supplier=Farnell; ComponentLink6URL: http://datasheet.octopart.com/F921C105MPA-KYOCERA-AVX-datasheet-104407996.pdf?src-supplier=Digikey; ComponentLink6Description: http://datasheet.octopart.com/F921C105MPA-KYOCERA-AVX-datasheet-104407996.pdf?src-supplier=Digikey; ComponentLink7URL: http://datasheets.avx.com/f92.pdf?src-supplier=Digikey; ComponentLink7Description: http://datasheets.avx.com/f92.pdf?src-supplier=Digikey; ComponentLink8URL: http://datasheet.octopart.com/F921C105MPA-KYOCERA-AVX-datasheet-104407996.pdf?src-supplier=Future+Electronics; ComponentLink8Description: http://datasheet.octopart.com/F921C105MPA-KYOCERA-AVX-datasheet-104407996.pdf?src-supplier=Future+Electronics
footprint Tant-0805
pins: 1, 2

## F980J107MMAAXE
designator C?, comment 100uF
CAP TANT 100UF 20% 6.3V 0603; Manufacturer: Kyocera AVX; Manufacturer Part Number: F980J107MMAAXE; Item Type: Capacitor; Supplier: Digi-Key; Supplier Part Number: 478-9836-1-ND; RoHS: Yes; Category: Tantalum Capacitors; Stock: 133089; Pricing: 1=0.71, 10=0.505, 50=0.382, 100=0.3327, 500=0.24644, 1000=0.20947 (USD); ComponentLink1URL: http://www.farnell.com/datasheets/2602422.pdf?src-supplier=Farnell; ComponentLink1Description: http://www.farnell.com/datasheets/2602422.pdf?src-supplier=Farnell; ComponentLink2URL: https://datasheet.octopart.com/F980J107MMAAXE-AVX-datasheet-104407997.pdf?src-supplier=Newark; ComponentLink2Description: https://datasheet.octopart.com/F980J107MMAAXE-AVX-datasheet-104407997.pdf?src-supplier=Newark; ComponentLink3URL: https://datasheet.octopart.com/F980J107MMAAXE-KYOCERA-AVX-datasheet-57254939.pdf?src-supplier=Future+Electronics; ComponentLink3Description: https://datasheet.octopart.com/F980J107MMAAXE-KYOCERA-AVX-datasheet-57254939.pdf?src-supplier=Future+Electronics; ComponentLink4URL: http://datasheets.avx.com/F98.pdf?src-supplier=Digi-Key; ComponentLink4Description: http://datasheets.avx.com/F98.pdf?src-supplier=Digi-Key; ComponentLink5URL: http://www.farnell.com/datasheets/2649022.pdf?src-supplier=Newark; ComponentLink5Description: http://www.farnell.com/datasheets/2649022.pdf?src-supplier=Newark; LCSC Part Number: C1955164
footprint F980J107MMAAXE
pins: 1, 2

## F981E105MMA
designator C?, comment 1uF
CAP TANT 1UF 20% 25V 0603; Manufacturer: Kyocera AVX; Manufacturer Part Number: F981E105MMA; ESR (Equivalent Series Resistance): 10R; Supplier 1: Digi-Key; RoHS: Yes; Category: Tantalum Capacitors; Stock 1: 11167; Pricing 1: 1=0.79000, 10=0.55800, 50=0.42220, 100=0.36770, 500=0.27236, 1000=0.23151 (USD); Mount: Surface Mount; Case/Package: 0603; Min Operating Temperature: -55°C; Max Operating Temperature: 125°C; Features: General Purpose; Packaging: Tape and Reel; Capacitance: 1uF; Tolerance: 20%; Voltage Rating: 25V; RoHS Compliant: Yes; ComponentLink1URL: http://www.mouser.com/ds/2/40/f98-775787.pdf?src-supplier=Mouser; ComponentLink1Description: http://www.mouser.com/ds/2/40/f98-775787.pdf?src-supplier=Mouser; ComponentLink2URL: http://www.farnell.com/datasheets/2096554.pdf?src-supplier=Newark; ComponentLink2Description: http://www.farnell.com/datasheets/2096554.pdf?src-supplier=Newark; ComponentLink3URL: http://datasheets.avx.com/F98.pdf?src-supplier=Digi-Key; ComponentLink3Description: http://datasheets.avx.com/F98.pdf?src-supplier=Digi-Key; Supplier Part Number 1: 478-8658-1-ND
footprint F981E105MMA
pins: 1, 2

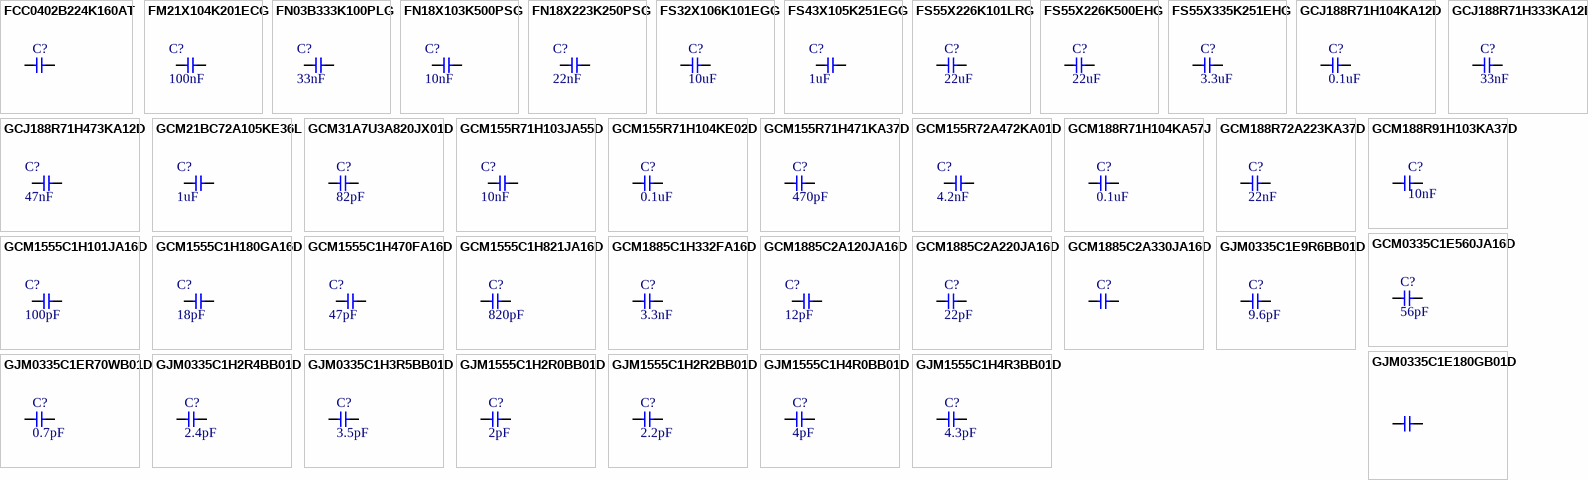
[diagram p11: symbols FCC0402B224K160AT to GJM1555C1H4R3BB01D]

## FCC0402B224K160AT
designator C?
16V 220nF X7R ±10% 0402 Multilayer Ceramic Capacitors MLCC - SMD/SMT ROHS; Manufacturer: FOJAN; Manufacturer Part Number: FCC0402B224K160AT; Package: 0402; LCSC Part Number: C7419415; Item Type: Capacitor; ComponentLink1Description: LCSC; ComponentLink1URL: https://www.lcsc.com/product-detail/Multilayer-Ceramic-Capacitors-MLCC-SMD-SMT_FOJAN-FCC0402B224K160AT_C7419415.html?s_z=n_GRM155R71C224KA12D
footprint Cap-0402
pins: 1, 2

## FM21X104K201ECG
designator C?, comment 100nF
200V 100nF X7R ±10% 0805 Multilayer Ceramic Capacitors MLCC - SMD/SMT ROHS; Manufacturer: PSA; Manufacturer Part Number: FM21X104K201ECG; Package: 0805; LCSC Part Number: C784084; Item Type: Capacitor; ComponentLink1Description: LCSC; ComponentLink1URL: https://www.lcsc.com/product-detail/Multilayer-Ceramic-Capacitors-MLCC-SMD-SMT_PSA-Prosperity-Dielectrics-FM21X104K201ECG_C784084.html
footprint Cap-0805 (SMD 0805)
pins: 1, 2

## FN03B333K100PLG
designator C?, comment 33nF
10V 33nF ±10% 0201 Multilayer Ceramic Capacitors MLCC - SMD/SMT ROHS; Manufacturer: PSA; Manufacturer Part Number: FN03B333K100PLG; Package: 0201; LCSC Part Number: C565516; Item Type: Capacitor
footprint CAP-0201
pins: 1, 2

## FN18X103K500PSG
designator C?, comment 10nF
50V 10nF X7R ±10% 0603 Multilayer Ceramic Capacitors MLCC - SMD/SMT ROHS; Manufacturer: PSA; Manufacturer Part Number: FN18X103K500PSG; Package: 0603; LCSC Part Number: C525264; Item Type: Capacitor; ComponentLink1Description: LCSC; ComponentLink1URL: https://www.lcsc.com/product-detail/Multilayer-Ceramic-Capacitors-MLCC-SMD-SMT_PSA-Prosperity-Dielectrics-FN18X103K500PSG_C525264.html
footprint Cap-0603
pins: 1, 2

## FN18X223K250PSG
designator C?, comment 22nF
25V 22nF X7R 0603 Multilayer Ceramic Capacitors MLCC - SMD/SMT ROHS; Manufacturer Part Number: FN18X223K250PSG; Manfacuturer: PSA; Package: 0603; Value: 22nF; ComponentLink1Description: LCSC; ComponentLink1URL: https://www.lcsc.com/product-detail/Multilayer-Ceramic-Capacitors-MLCC-SMD-SMT_PSA-Prosperity-Dielectrics-FN18X223K250PSG_C2929161.html; Item Type: Capacitor; LCSC Part Number: C2929161
footprint Cap-0603
pins: 1, 2

## FS32X106K101EGG
designator C?, comment 10uF
100V 10uF X7R ±10% 1210 Multilayer Ceramic Capacitors MLCC - SMD/SMT ROHS; Manufacturer: PSA(Prosperity Dielectrics); Manufacturer Part Number: FS32X106K101EGG; Package: 1210; LCSC Part Number: C5156756; Item Type: Capacitor; ComponentLink1Description: LCSC; ComponentLink1URL: https://www.lcsc.com/product-detail/Multilayer-Ceramic-Capacitors-MLCC-SMD-SMT_PSA-Prosperity-Dielectrics-FS32X106K101EGG_C5156756.html
footprint Cap-1210 (SMD 1210)
pins: 1, 2

## FS43X105K251EGG
designator C?, comment 1uF
250V 1uF X7R ±10% 1812 Multilayer Ceramic Capacitors MLCC - SMD/SMT ROHS; Manufacturer: PSA; Manufacturer Part Number: FS43X105K251EGG; Package: 1812; LCSC Part Number: C381468; Item Type: Capacitor; ComponentLink1Description: LCSC; ComponentLink1URL: https://www.lcsc.com/product-detail/Multilayer-Ceramic-Capacitors-MLCC-SMD-SMT_PSA-Prosperity-Dielectrics-FS43X105K251EGG_C381468.html
footprint Cap-1812
pins: 1, 2

## FS55X226K101LRG
designator C?, comment 22uF
100V 22uF X7R ±10% 2220 Multilayer Ceramic Capacitors MLCC - SMD/SMT ROHS; Manufacturer: PSA; Manufacturer Part Number: FS55X226K101LRG; Package: 2220; LCSC Part Number: C7499406; Item Type: Capacitor; ComponentLink1Description: LCSC; ComponentLink1URL: https://www.lcsc.com/product-detail/Multilayer-Ceramic-Capacitors-MLCC-SMD-SMT_PSA-Prosperity-Dielectrics-FS55X226K101LRG_C7499406.html
footprint Cap 2220
pins: 1, 2

## FS55X226K500EHG
designator C?, comment 22uF
50V 22uF X7R ±10% 2220 Multilayer Ceramic Capacitors MLCC - SMD/SMT ROHS; Manufacturer: PSA; Manufacturer Part Number: FS55X226K500EHG; Package: 2220; LCSC Part Number: C784103; Item Type: Capacitor; ComponentLink1Description: LCSC; ComponentLink1URL: https://www.lcsc.com/product-detail/Multilayer-Ceramic-Capacitors-MLCC-SMD-SMT_PSA-Prosperity-Dielectrics-FS55X226K500EHG_C784103.html?s_z=n_FS55X226K500EHG
footprint Cap 2220
pins: 1, 2

## FS55X335K251EHG
designator C?, comment 3.3uF
250V 3.3uF X7R ±10% 2220 Multilayer Ceramic Capacitors MLCC - SMD/SMT ROHS; Manufacturer: PSA(Prosperity Dielectrics); Manufacturer Part Number: FS55X335K251EHG; Package: 2220; LCSC Part Number: C22370027; Item Type: Capacitor; ComponentLink1Description: LCSC; ComponentLink1URL: https://www.lcsc.com/product-detail/Multilayer-Ceramic-Capacitors-MLCC-SMD-SMT_PSA-Prosperity-Dielectrics-FS55X335K251EHG_C22370027.html
footprint Cap 2220
pins: 1, 2

## GCJ188R71H104KA12D
designator C?, comment 0.1uF
CAP CER 0.1UF 50V X7R 0603; Manufacturer: Murata; Manufacturer Part Number: GCJ188R71H104KA12D; Item Type: Capacitors; Material: 4241ConductorMaterial; Value: 100nF; Tolerance: 10%; Supplier: Mouser; LCSC Part Number: C161115; RoHS: Yes; Stock: 342536; Pricing: 1=0.13, 10=0.056, 50=0.056, 100=0.036, 1000=0.032, 10000=0.02 (USD); Mounting Technology: Surface Mount; Case/Package: 0603; Case Code (Metric): 1608; Case Code (Imperial): 0603; Min Operating Temperature: -55°C; Max Operating Temperature: 125°C; Dielectric: X7R; Package Quantity: 1; Voltage Rating: 50V; Packaging: Tape and Reel; Voltage Rating (DC): 50V; Termination: SMD/SMT; Features: Soft Termination; Series: GCJ; Construction: Flat; Length: 1.6mm; Width: 0.031inch; Height: 0.8mm; Thickness: 0.035inch; Depth: 0.8mm; Ratings: AEC-Q200; Radiation Hardening: No; RoHS Compliant: Yes; Lead Free: 5697LeadFree; ComponentLink1URL: https://datasheet.ciiva.com/135/product-135604.pdf?src-supplier=Digikey; ComponentLink1Description: https://datasheet.ciiva.com/135/product-135604.pdf?src-supplier=Digikey; ComponentLink2URL: https://datasheet.ciiva.com/26889/getdatasheetpartid-369886-26889118.pdf?src-supplier=Verical; ComponentLink2Description: https://datasheet.ciiva.com/26889/getdatasheetpartid-369886-26889118.pdf?src-supplier=Verical; ComponentLink3URL: https://datasheet.ciiva.com/135/s0717e-135605.pdf?src-supplier=Digikey; ComponentLink3Description: https://datasheet.ciiva.com/135/s0717e-135605.pdf?src-supplier=Digikey; ComponentLink4URL: https://datasheet.ciiva.com/135/s0717e-135606.pdf?src-supplier=Digikey; ComponentLink4Description: https://datasheet.ciiva.com/135/s0717e-135606.pdf?src-supplier=Digikey; ComponentLink5URL: https://datasheet.ciiva.com/16440/c03e-16440425.pdf?src-supplier=Future+Electronics; ComponentLink5Description: https://datasheet.ciiva.com/16440/c03e-16440425.pdf?src-supplier=Future+Electronics
footprint Cap-0603
pins: 1, 2

## GCJ188R71H333KA12D
designator C?, comment 33nF
CAP CER 0.033UF 50V X7R 0603; Manufacturer: Murata; Manufacturer Part Number: GCJ188R71H333KA12D; Item Type: Capacitors; Tolerance: 10%; Supplier: Mouser; LCSC Part Number: C2173059; RoHS: Yes; Stock: 15481; Pricing: 1=0.18, 10=0.072, 50=0.072, 100=0.047, 1000=0.039, 10000=0.027 (USD); Mounting Technology: Surface Mount; Case/Package: 0603; Case Code (Imperial): 0603; Case Code (Metric): 1608; Min Operating Temperature: -55°C; Max Operating Temperature: 125°C; Packaging: Tape and Reel; Value: 33nF; Package Quantity: 1; Voltage Rating: 50V; Dielectric: X7R; Voltage Rating (DC): 50V; Termination: SMD/SMT; Features: Soft Termination; Series: GCJ; Length: 1.6mm; Width: 0.031inch; Thickness: 0.031inch; Depth: 0.8mm; Ratings: AEC-Q200; Lead Free: Lead Free; RoHS Compliant: Yes; ComponentLink1URL: https://datasheet.ciiva.com/168/product-168891.pdf?src-supplier=Digikey; ComponentLink1Description: https://datasheet.ciiva.com/168/product-168891.pdf?src-supplier=Digikey; ComponentLink2URL: https://datasheet.ciiva.com/168/s0717e-168892.pdf?src-supplier=Digikey; ComponentLink2Description: https://datasheet.ciiva.com/168/s0717e-168892.pdf?src-supplier=Digikey; ComponentLink3URL: https://datasheet.ciiva.com/168/s0717e-168893.pdf?src-supplier=Digikey; ComponentLink3Description: https://datasheet.ciiva.com/168/s0717e-168893.pdf?src-supplier=Digikey
footprint Cap-0603
pins: 1, 2

## GCJ188R71H473KA12D
designator C?, comment 47nF
CAP CER 0.047UF 50V X7R 0603; Manufacturer: Murata; Manufacturer Part Number: GCJ188R71H473KA12D; Item Type: Capacitors; Supplier: Mouser; LCSC Part Number: C354386; RoHS: Yes; Stock: 52710; Pricing: 1=0.19, 10=0.077, 50=0.077, 100=0.05, 1000=0.042, 10000=0.027 (USD); ComponentLink1URL: https://datasheet.ciiva.com/169/product-169143.pdf?src-supplier=Digikey; ComponentLink1Description: https://datasheet.ciiva.com/169/product-169143.pdf?src-supplier=Digikey; ComponentLink2URL: https://datasheet.ciiva.com/169/s0717e-169144.pdf?src-supplier=Digikey; ComponentLink2Description: https://datasheet.ciiva.com/169/s0717e-169144.pdf?src-supplier=Digikey; ComponentLink3URL: https://datasheet.ciiva.com/169/s0717e-169145.pdf?src-supplier=Digikey; ComponentLink3Description: https://datasheet.ciiva.com/169/s0717e-169145.pdf?src-supplier=Digikey
footprint Cap-0603
pins: 1, 2

## GCM21BC72A105KE36L
designator C?, comment 1uF
CAP CER 1UF 100V X7S 0805; Manufacturer: Murata; Manufacturer Part Number: GCM21BC72A105KE36L; Tolerance: 10%; Supplier 1: Digi-Key; RoHS: Yes; Category: Ceramic Capacitors; Stock 1: 179138; Pricing 1: 1=0.48000, 10=0.34100, 50=0.25800, 100=0.22480, 500=0.16650, 1000=0.14152 (USD); Mount: Surface Mount; Case/Package: 0805; Case Code (Imperial): 0805; Case Code (Metric): 2012; Min Operating Temperature: -55°C; Max Operating Temperature: 125°C; Packaging: Cut Tape; Capacitance: 1uF; Voltage Rating: 100V; Ratings: AEC-Q200; RoHS Compliant: Yes; ComponentLink1URL: http://search.murata.co.jp/Ceramy/image/img/A01X/partnumbering_e_02.pdf?src-supplier=Digi-Key; ComponentLink1Description: http://search.murata.co.jp/Ceramy/image/img/A01X/partnumbering_e_02.pdf?src-supplier=Digi-Key; Supplier Part Number 1: 490-14436-1-ND; LCSC Part Number: C2842838
footprint Cap-0805 (SMD 0805)
pins: 1, 2

## GCM31A7U3A820JX01D
designator C?, comment 82pF
CAP CER 82PF 1KV U2J 1206; Manufacturer: Murata; Manufacturer Part Number: GCM31A7U3A820JX01D; Item Type: Capacitors; Supplier: Digikey; LCSC Part Number: C5125804; RoHS: Yes; Pricing: 4000=0.07144 (USD)
footprint Cap-1206 (SMD 1206)
pins: 1, 2

## GCM155R71H103JA55D
designator C?, comment 10nF
CAP CER 10000PF 50V X7R 0402; Manufacturer: Murata; Manufacturer Part Number: GCM155R71H103JA55D; Tolerance: 5%; Item Type: Capacitor; Supplier: Digikey; Supplier Part Number: 490-14352-2-ND; RoHS: Yes; Category: Ceramic Capacitors; Mounting Technology: Surface Mount; Case/Package: 0402; Case Code (Imperial): 0402; Case Code (Metric): 1005; Min Operating Temperature: -55°C; Max Operating Temperature: 125°C; Packaging: Cut Tape; Value: 10nF; Voltage Rating: 50V; Series: GCM; Ratings: AEC-Q200; RoHS Compliant: Yes; ComponentLink1URL: http://search.murata.co.jp/Ceramy/image/img/A01X/partnumbering_e_02.pdf?src-supplier=Digikey; ComponentLink1Description: http://search.murata.co.jp/Ceramy/image/img/A01X/partnumbering_e_02.pdf?src-supplier=Digikey; ComponentLink2URL: http://search.murata.co.jp/Ceramy/image/img/A01X/G101/ENG/GCM155R71H103JA55-01.pdf?src-supplier=Digikey; ComponentLink2Description: http://search.murata.co.jp/Ceramy/image/img/A01X/G101/ENG/GCM155R71H103JA55-01.pdf?src-supplier=Digikey; LCSC Part Number: C5189696
footprint Cap-0402
pins: 1, 2